# Altium footprint library JST_S2B-PH-SM4-TB.PcbLib: 1 footprints
Each footprint in its own frame and in the unit in brackets; x right, y up, seen from the top. Pads: shape width x height; smd on the part's side, far side on the other; paste and mask are expansions set on the pad; w line width, h text height; cw(c..) or ccw(c..) is an arc to the next point about the centre after c.
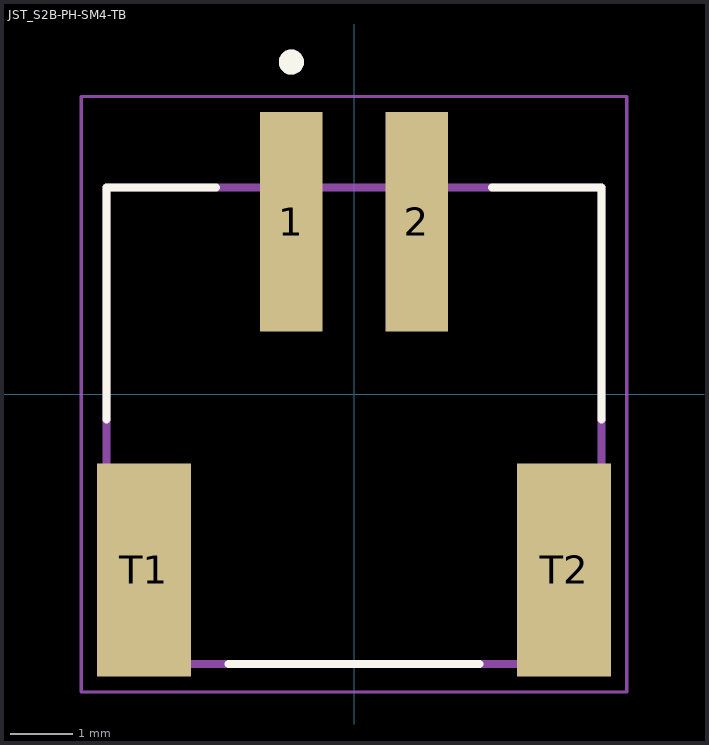
[diagram p0: the footprint, top view; thin cyan lines are the x and y axes]

## JST_S2B-PH-SM4-TB [mm]
height 5.5
pads (4):
  rect 1x3.5 smd paste+0 mask+0.102: 1(-1,2.75) 2(1,2.75)
  rect 1.5x3.4 smd paste+0 mask+0.102: T1(-3.35,-2.8) T2(3.35,-2.8)
Top Overlay:
  circle w0.2: c-1,5.3 r0.1
  lines w0.127: -3.95,-0.4 -3.95,3.3 -2.2,3.3 ; -2,-4.3 2,-4.3 ; 2.2,3.3 3.95,3.3 3.95,-0.4
Assembly Top:
  circle w0.2: c-1,5.3 r0.1
  lines w0.127: -3.95,-4.3 3.95,-4.3 3.95,3.3 -3.95,3.3 -3.95,-4.3
Courtyard Top:
  lines w0.05: -4.35,-4.75 -4.35,4.75 4.35,4.75 4.35,-4.75 -4.35,-4.75
3D body "S2B-PH-SM4-TB--3DModel-STEP-269445.STEP": height 5.5, standoff -0.1, extent -3.963,-4.554 3.937,4.046